# Altium footprint library ant.PcbLib: 5 footprints
Each footprint in its own frame and in the unit in brackets; x right, y up, seen from the top. Pads: shape width x height; smd on the part's side, far side on the other; paste and mask are expansions set on the pad; w line width, h text height; cw(c..) or ccw(c..) is an arc to the next point about the centre after c.
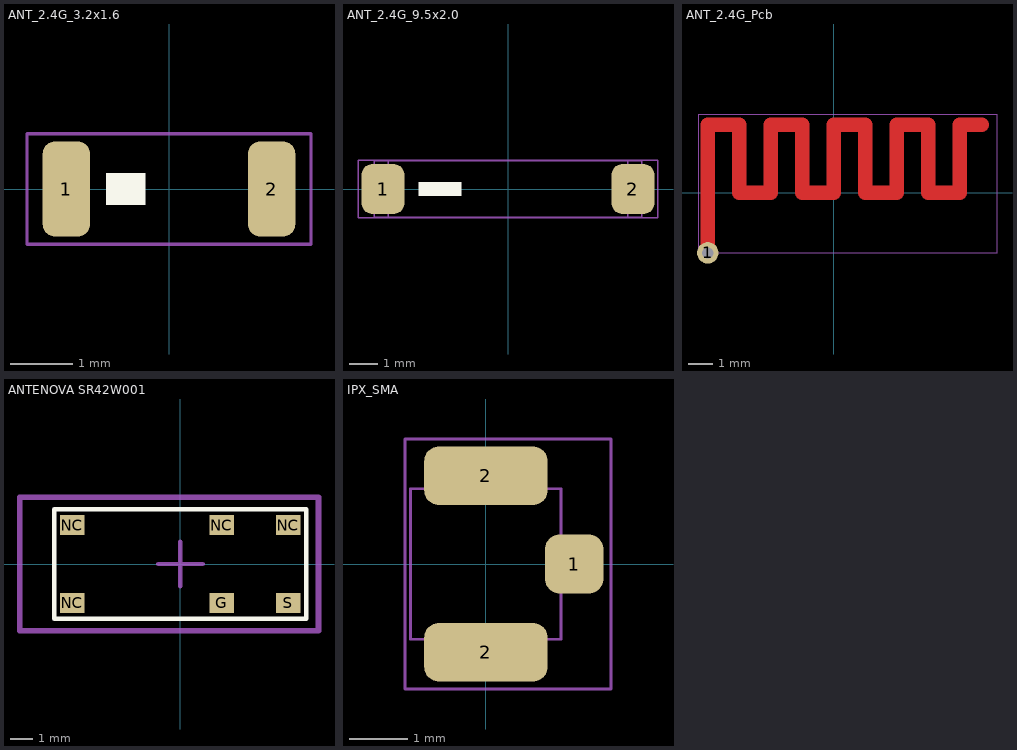
[diagram p0: the footprints below, top view; thin cyan lines are the x and y axes]

## ANT_2.4G_3.2x1.6 [mil]
height 47.24
pads (2):
  rrect50% 30x60 smd: 1(-65,0) 2(65,0)
Top Overlay:
  rectangle: -40,-10 -15,10
Top Component (Mech14):
  lines w2: -90,-35 90,-35 90,35 -90,35 -90,-35
  text ".Designator" at -20,-14 h50
3D body "User Library-2450AT18A100E.STEP": height 53.15, standoff -1.97, extent -64.96,-33.46 64.96,33.47

## ANT_2.4G_9.5x2.0 [mil]
height 47.24
pads (2):
  rrect50% 60x70 smd: 1(-175,0) 2(175,0)
Top Overlay:
  rectangle: -125,-10 -65,10
Mechanical 13:
  lines w2: -167.32,-39.37 -167.32,39.37 ; 167.32,-39.37 167.32,39.37 ; -187.01,-39.37 -187.01,39.37 187.01,39.37 187.01,-39.37 -187.01,-39.37
Top Component (Mech14):
  lines w2: -210,-40 -210,40 210,40 210,-40 -210,-40
  text ".Designator" at -32,-23 h80
3D body "User Library-ANTENNA_WLAN.STEP": height 40.16, standoff -0.79, extent -187.8,-40 187.8,40.31

## ANT_2.4G_Pcb [mil]
pads (1):
  round 35 hole 18: 1(-204.72,-98)
Top Layer:
  lines w23.62: -204.72,-94.49 -204.72,110.24 -153.54,110.24 -153.54,0 -102.36,0 -102.36,110.24 -51.18,110.24 -51.18,0 0,0 0,110.24 51.18,110.24 51.18,0 102.36,0 102.36,110.24 153.54,110.24 153.54,0 204.72,0 204.72,110.24 240.16,110.24
Top Component (Mech14):
  lines w2: -219.72,-98 265.28,-98 265.28,127 -219.72,127 -219.72,-98
  text ".Designator" at -32,-23 h80

## ANTENOVA SR42W001 [mm]
height 0.9
pads (6):
  rect 1.1x0.9 smd: G(1.85,-1.75) NC(-4.85,-1.75) NC(-4.85,1.75) NC(1.85,1.75) NC(4.85,1.75) S(4.85,-1.75)
Top Overlay:
  lines w0.2: -5.65,-2.45 -5.65,-1.75 -5.65,2.45 5.65,2.45 5.65,-2.45 -5.65,-2.45
Top Component (Mech14):
  lines w0.051: -7.239,-3.048 6.223,-3.048 6.223,3.048 -7.239,3.048 -7.239,-3.048
  text ".Designator" at -0.813,-0.584 h2.03
Component Center (Mech19):
  lines w0.2: -1,0 1,0 ; 0,-1 0,1
  lines w0.254: -7.2,-3 6.2,-3 6.2,3 -7.2,3 -7.2,-3
3D body "Antenova SR42W001_Mutica.STEP": height 0.88, standoff 0, extent -5.65,-2.5 5.65,2.5

## IPX_SMA [mil]
pads (3):
  rrect50% 40x40 smd: 1(60,0)
  rrect50% 84x40 smd: 2(0,-60) 2(0,60)
Mechanical 13:
  lines w2: -51.18,-51.18 -51.18,51.18 51.18,51.18 51.18,-51.18 -51.18,-51.18
Top Component (Mech14):
  lines w2: -55,-85 -55,85 85,85 85,-85 -55,-85
  text ".Designator" at -16,-11 h40